# Altium footprint library BM04BSRSSTBLFSN.PcbLib: 1 footprints
Each footprint in its own frame and in the unit in brackets; x right, y up, seen from the top. Pads: shape width x height; smd on the part's side, far side on the other; paste and mask are expansions set on the pad; w line width, h text height; cw(c..) or ccw(c..) is an arc to the next point about the centre after c.
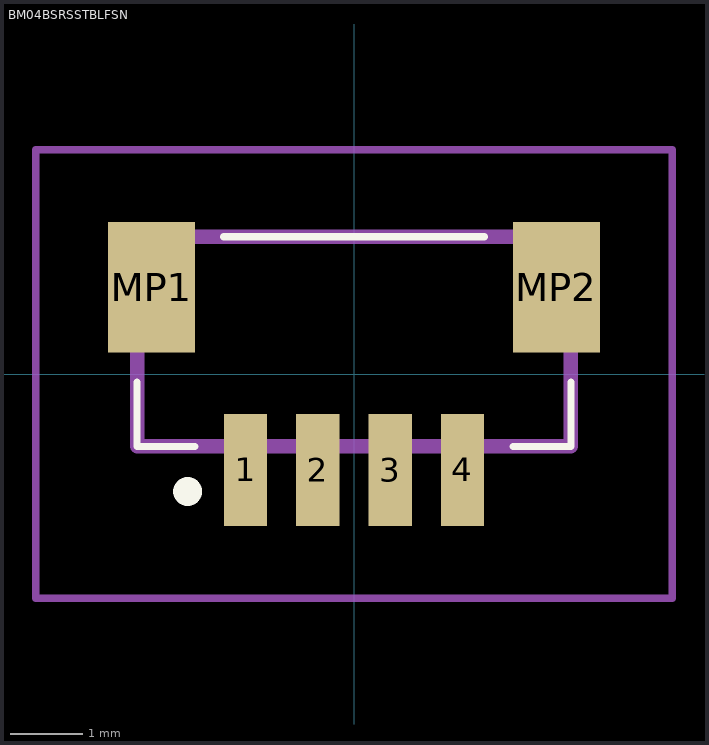
[diagram p0: the footprint, top view; thin cyan lines are the x and y axes]

## BM04BSRSSTBLFSN [mm]
pads (6):
  rect 0.6x1.55 smd: 1(-1.5,-1.325) 2(-0.5,-1.325) 3(0.5,-1.325) 4(1.5,-1.325)
  rect 1.2x1.8 smd: MP1(-2.8,1.2) MP2(2.8,1.2)
Top Overlay:
  lines w0.1: -3,-0.113 -3,-1.001 -2.2,-1.001 ; -1.8,1.899 1.8,1.899 ; 2.2,-1.001 3,-1.001 3,-0.113
  lines w0.2: -2.3,-1.724 cw(c-2.3,-1.625) -2.3,-1.525 cw(c-2.3,-1.625) -2.3,-1.724 ; -2.3,-1.725 -2.3,-1.725 ; -2.3,-1.525 -2.3,-1.525
Mechanical 15:
  lines w0.2: -3,-1.001 3,-1.001 3,1.899 -3,1.899 -3,-1.001
Mechanical 20:
  lines w0.1: -4.4,-3.101 4.4,-3.101 4.4,3.101 -4.4,3.101 -4.4,-3.101